# Altium footprint library FootPrintLib_10.PcbLib: 270 footprints (part 11 of 17)
Each footprint in its own frame and in the unit in brackets; x right, y up, seen from the top. Pads: shape width x height; smd on the part's side, far side on the other; paste and mask are expansions set on the pad; w line width, h text height; cw(c..) or ccw(c..) is an arc to the next point about the centre after c.
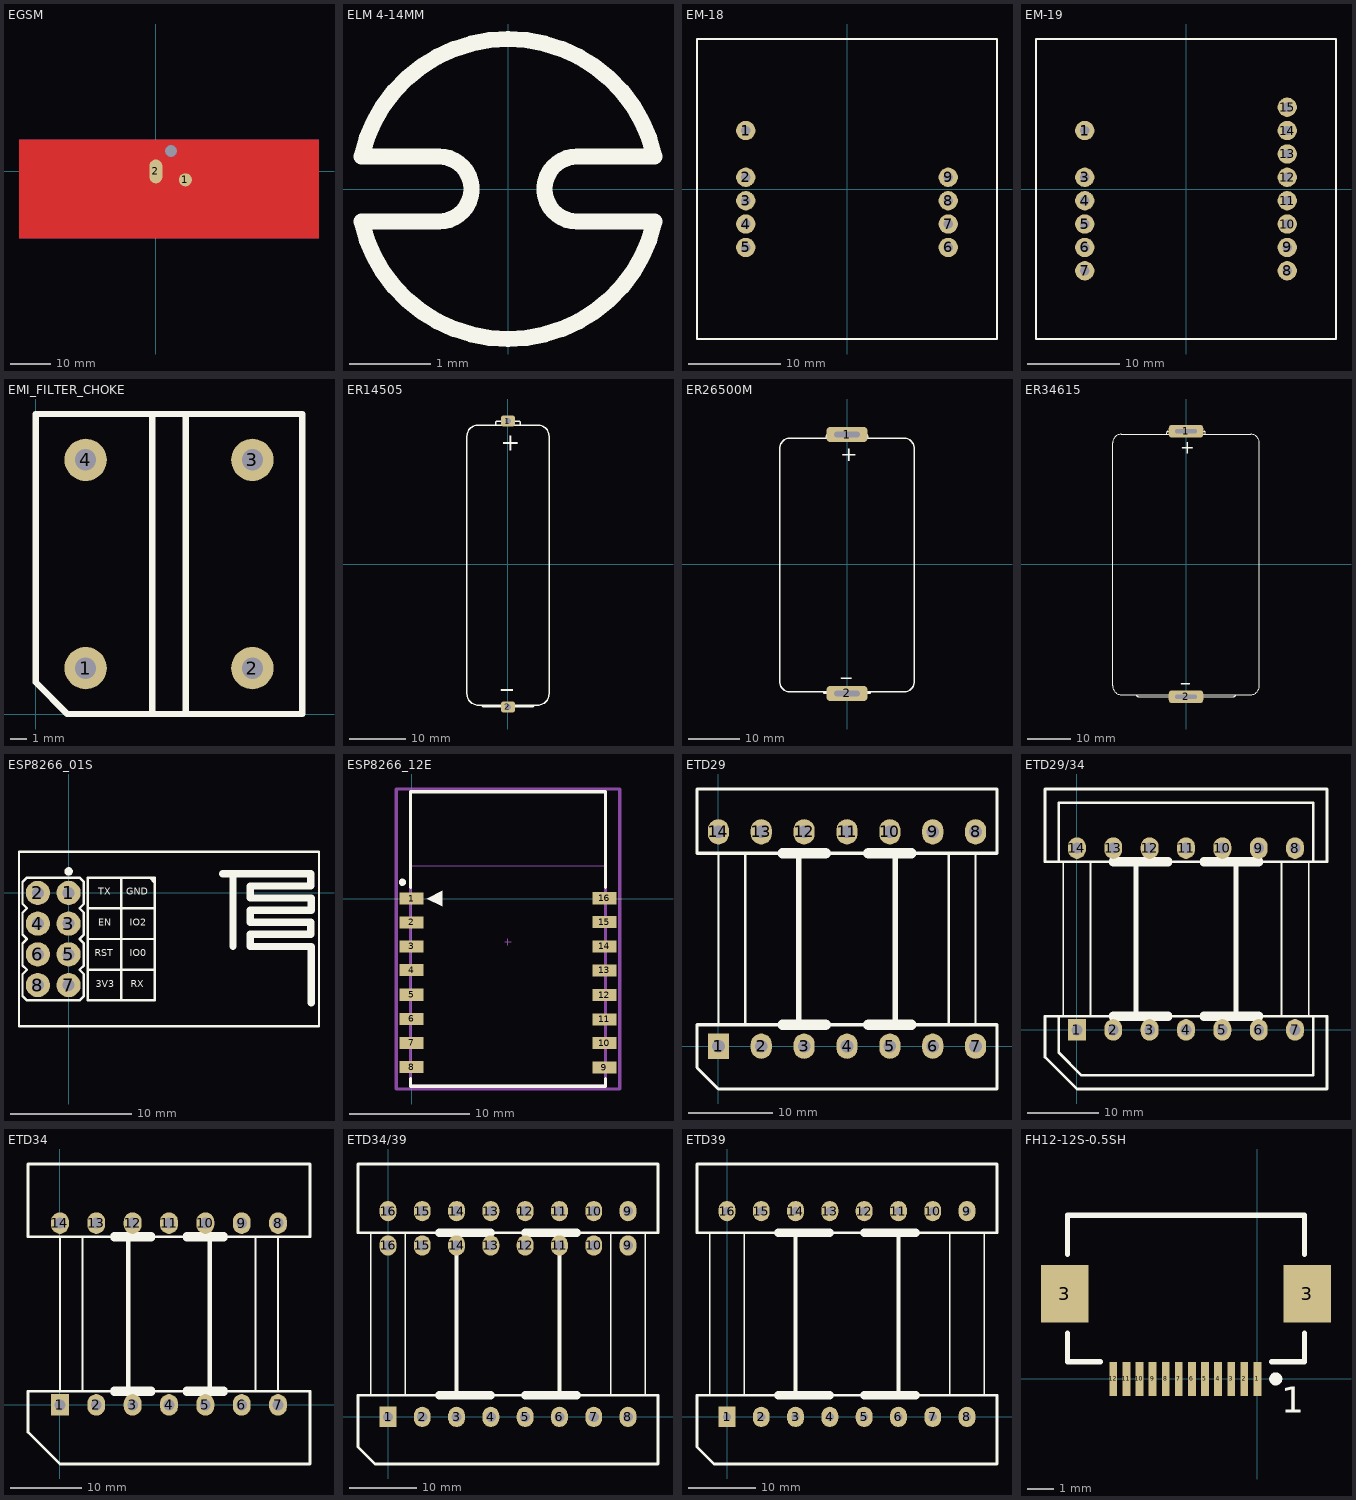
[diagram p10: the footprints below, top view; thin cyan lines are the x and y axes]

## EGSM [mm] "EGSM Antenna (900MHz Band)"
height 9.4
pads (3):
  round 1.27 hole 3 unplated: 0(3.788,5.058)
  round 3.25 smd: 1(7.349,-2.085)
  oval 3.25x5.95 smd: 2(0,0)
Top Layer:
  rectangle: -17.736,-4.874 -11.236,-1.354
  rectangle: -34.086,-16.674 -14.686,-15.014
  region: -33.286,7.926 -34.086,7.926 -34.086,-16.674 -33.286,-16.674
  rectangle: 0.314,-14.374 1.614,-0.123
  rectangle: -34.086,-1.354 -10.486,7.926
  rectangle: -17.736,-4.874 -4.498,-4.074
  rectangle: -19.729,-7.6 -4.832,-6.66
  rectangle: -19.729,-10.063 -5.889,-9.093
  region: -0.376,-13.163 0.276,-13.847 1.019,-13.139 0.367,-12.455
  region: 6.971,-12.455 6.319,-13.139 7.062,-13.847 7.714,-13.163
  region: 27.067,-9.093 13.227,-9.093 13.227,-10.063 27.067,-10.063
  region: 27.067,-6.66 12.17,-6.66 12.17,-7.6 27.067,-7.6
  region: 25.074,-4.074 11.836,-4.074 11.836,-4.874 25.074,-4.874
  region: 40.624,7.926 17.024,7.926 17.024,-1.354 40.624,-1.354
  region: 7.024,-2.012 5.724,-2.012 5.724,-14.374 7.024,-14.374
  rectangle: 39.824,-16.674 40.624,7.926
  region: 40.624,-15.014 21.724,-15.014 21.724,-16.674 40.624,-16.674
  region: 25.074,-1.354 17.774,-1.354 17.774,-4.874 25.074,-4.874
  pour cut-out: -34.086,7.926 -34.086,-16.674 40.624,-16.674 40.624,7.926
  region: -20.683,-6.665 -25.006,-9.764 -22.386,-12.014 -19.497,-9.953 -19.583,-9.365 -20.002,-8.806 -20.141,-8.362 -19.906,-7.639 -19.539,-7.413 -19.524,-6.784
  region: -4.498,-4.074 0.344,-7.439 0.34,-11.935 -5.896,-7.587 -4.642,-6.497 -4.344,-5.922 -4.54,-5.137 -4.818,-4.88 -4.622,-4.13
  region: -5.889,-9.093 -5.889,-10.063 0.314,-14.374 0.314,-13.404
  region: 13.227,-9.093 13.227,-10.063 7.024,-14.374 7.024,-13.404
  region: 11.836,-4.074 6.994,-7.439 6.998,-11.935 13.234,-7.587 11.98,-6.497 11.682,-5.922 11.878,-5.137 12.156,-4.88 11.96,-4.13
  region: 28.021,-6.665 32.344,-9.764 29.724,-12.014 26.835,-9.953 26.921,-9.365 27.34,-8.806 27.479,-8.362 27.244,-7.639 26.877,-7.413 26.862,-6.784
  lines w0.254: -33.42,-14.712 ccw(c-32.99,-14.712) -32.988,-15.142 ; -33.418,-1.655 cw(c-32.988,-1.654) -32.988,-1.224 ; -20.637,-6.787 -4.488,-6.787 ; -19.498,-9.332 cw(c-18.994,-8.325) -19.475,-7.307 ; -18.044,-1.218 cw(c-18.042,-1.648) -17.612,-1.648 ; -11.367,-1.653 cw(c-10.937,-1.652) -10.937,-1.222 ; -11.365,-3.773 ccw(c-10.935,-3.773) -10.933,-4.203 ; -5.033,-6.778 ccw(c-5.514,-5.759) -5.01,-4.752 ; -0.433,-13.025 ccw(c-0.431,-12.164) 0.357,-11.817 ; 6.981,-11.817 ccw(c7.769,-12.164) 7.771,-13.025 ; 12.348,-4.752 ccw(c12.852,-5.759) 12.371,-6.778 ; 17.473,-4.203 ccw(c17.475,-3.773) 17.905,-3.773 ; 17.475,-1.222 cw(c17.475,-1.652) 17.905,-1.653 ; 25.954,-6.787 27.986,-6.787 ; 26.813,-7.307 cw(c26.332,-8.325) 26.836,-9.332 ; 39.519,-15.145 ccw(c39.521,-14.715) 39.951,-14.715 ; 39.519,-1.222 cw(c39.519,-1.652) 39.949,-1.653
Bottom Layer:
  pour cut-out: -34.086,7.926 -34.086,-16.674 40.624,-16.674 40.624,7.926

## ELM 4-14MM [mm] "LED Mounting Hardware"
height 14
Top Overlay:
  lines w0.2: -1.806,-0.401 ccw(c0,0) 1.806,-0.401 ; -1.806,0.401 cw(c0,0) 1.806,0.401 ; -1.803,-0.4 -0.85,-0.4 ccw(c-0.85,0) -0.85,0.4 -1.803,0.4 ; 1.803,-0.4 0.85,-0.4 cw(c0.85,0) 0.85,0.4 1.803,0.4
3D body "ELM 4.STEP": height 12.7, standoff 0, extent -1.796,-1.841 1.796,1.842

## EM-18 [mm] "RFID Reader Module 32/6x32/6mm"
height 9.2
pads (9):
  round 2.1 hole 1: 1(-11,6.35) 2(-11,1.27) 3(-11,-1.27) 4(-11,-3.81) 5(-11,-6.35) 6(11,-6.35) 7(11,-3.81) 8(11,-1.27) 9(11,1.27)
Top Overlay:
  lines w0.2: -16.3,-16.3 -16.3,16.3 16.3,16.3 16.3,-16.3 -16.3,-16.3
3D body: height 9.2, standoff -2.5, extent 7.025,-0.95 7.025,-0.95
3D body: height 9.2, standoff -2.5, extent 0.525,-1.175 0.525,-1.175
3D body: height 9.2, standoff -2.5, extent -8.675,-0.925 -8.675,-0.925
3D body: height 1.9, standoff 0, extent 16.3,16.3 16.3,16.3
3D body: height 1.9, standoff 0, extent 16.3,16.3 16.3,16.3
3D body: height 9.2, standoff -2.5, extent 12.8,7.425 12.8,7.425
3D body "EM_18.step": height 9.21, standoff -2.5, extent -16.3,-16.3 16.3,16.3

## EM-19 [mm] "RFID Reader Module 32/6x32/6mm"
height 9.2
pads (14):
  round 2.1 hole 1: 1(-11,6.35) 3(-11,1.27) 4(-11,-1.27) 5(-11,-3.81) 6(-11,-6.35) 7(-11,-8.89) 8(11,-8.89) 9(11,-6.35) 10(11,-3.81) 11(11,-1.27) 12(11,1.27) 13(11,3.81) 14(11,6.35) 15(11,8.89)
Top Overlay:
  lines w0.2: -16.3,-16.3 -16.3,16.3 16.3,16.3 16.3,-16.3 -16.3,-16.3
3D body "EM_19.step": height 9.21, standoff -2.5, extent -16.3,-16.3 16.3,16.3
3D body: height 1.9, standoff 0, extent 16.3,16.3 16.3,16.3
3D body: height 1.9, standoff 0, extent 16.3,16.3 16.3,16.3

## EMI_FILTER_CHOKE [mm] "Common Mode Inductors/EMI Filters For AC Power Supply"
height 20.5
pads (4):
  round 2.54 hole 1.27: 1(3,2.75) 2(13,2.75) 3(13,15.25) 4(3,15.25)
Top Overlay:
  lines w0.381: 7,0 7,18 ; 9,0 9,18 ; 0,1.905 1.905,0 16,0 16,18 0,18 0,1.905

## ER14505 [mm] "Primary Lithium Thionyl Chloride 3V6, 2400mA"
height 14.5
pads (2):
  rrect50% 2.5x2 hole 1: 1(0,25.25) 2(0,-25.25)
Top Overlay:
  lines w0.254: -4.55,-24.95 ccw(c-4.25,-24.95) -4.25,-25.25 4.25,-25.25 ccw(c4.25,-24.95) 4.55,-24.95 ; -2.2,24.55 -2.2,24.95 cw(c-1.9,24.95) -1.9,25.25 1.9,25.25 cw(c1.9,24.95) 2.2,24.95 2.2,24.55 ; -7.25,-22.95 ccw(c-5.25,-22.95) -5.25,-24.95 5.25,-24.95 ccw(c5.25,-22.95) 7.25,-22.95 7.25,22.55 ccw(c5.25,22.55) 5.25,24.55 -5.25,24.55 ccw(c-5.25,22.55) -7.25,22.55 -7.25,-22.95
  text "_" at -1.15,-21.5 h3
  text "+" at -1.3,20 h3
3D body "User Library-BATTERY_AA.STEP": height 14.26, standoff 0.24, extent -7.01,-24.892 7.01,24.908

## ER26500M [mm] "Primary Lithium Thionyl Chloride 3V6, 6500mA"
height 26.2
pads (2):
  rrect50% 8x3 hole 1 slot 5 at 0 deg: 1(0,25.25) 2(0,-25.25)
Top Overlay:
  lines w0.254: -4.55,-24.95 ccw(c-4.25,-24.95) -4.25,-25.25 4.25,-25.25 ccw(c4.25,-24.95) 4.55,-24.95 ; -4,24.55 -4,24.95 cw(c-3.7,24.95) -3.7,25.25 3.7,25.25 cw(c3.7,24.95) 4,24.95 4,24.55 ; -13.1,-22.95 ccw(c-11.1,-22.95) -11.1,-24.95 11.1,-24.95 ccw(c11.1,-22.95) 13.1,-22.95 13.1,22.55 ccw(c11.1,22.55) 11.1,24.55 -11.1,24.55 ccw(c-11.1,22.55) -13.1,22.55 -13.1,-22.95
  text "_" at -1.15,-21.5 h3
  text "+" at -1.3,20 h3
3D body "User Library-Bateria 1,5v.STEP": height 25.75, standoff 0.45, extent -12.65,-24.892 12.65,24.908

## ER34615 [mm] "Primary Lithium Thionyl Chloride 3V6, 6500mA"
height 26.2
pads (2):
  rrect50% 8x3 hole 1 slot 5 at 0 deg: 1(0,30.75) 2(0,-30.75)
Top Overlay:
  lines w0.254: -11.5,-30.25 ccw(c-11,-30.25) -11,-30.75 11,-30.75 ccw(c11,-30.25) 11.5,-30.25 ; -4.5,30.05 -4.5,30.45 cw(c-4.2,30.45) -4.2,30.75 4.2,30.75 cw(c4.2,30.45) 4.5,30.45 4.5,30.05 ; -17,-28.25 ccw(c-15,-28.25) -15,-30.25 15,-30.25 ccw(c15,-28.25) 17,-28.25 17,28.05 ccw(c15,28.05) 15,30.05 -15,30.05 ccw(c-15,28.05) -17,28.05 -17,-28.25
  text "+" at -1.3,25.5 h3
  text "_" at -1.15,-27 h3
3D body "SW3dPS-d-cell battery.STEP": height 33.75, standoff 0.25, extent -16.75,-30.251 16.75,30.249

## ESP8266_01S [mm]
height 5.5
pads (8):
  round 2 hole 1: 1(0,0) 2(-2.54,0) 3(0,-2.54) 4(-2.54,-2.54) 5(0,-5.08) 6(-2.54,-5.08) 7(0,-7.62) 8(-2.54,-7.62)
Top Overlay:
  circle w0.4: c0,1.775 r0.15
  lines w0.2: -3.45,-6.35 -3.81,-5.99 -3.81,-4.18 -3.44,-3.81 ; -3.45,-3.81 -3.81,-3.45 -3.81,-1.64 -3.44,-1.27 -3.81,-0.9 -3.81,0.91 -3.45,1.27 0.91,1.27 1.27,0.91 1.27,-0.9 0.9,-1.27 1.27,-1.64 1.27,-3.45 0.91,-3.81 ; -3.44,-6.35 -3.81,-6.72 -3.81,-8.53 -3.45,-8.89 0.91,-8.89 1.27,-8.53 1.27,-6.72 0.9,-6.35 ; 0.9,-3.81 1.27,-4.18 1.27,-5.99 0.91,-6.35 ; 1.6,-6.35 7.125,-6.35 ; 1.6,-3.81 7.125,-3.81 ; 1.6,-1.27 7.125,-1.27 ; 4.363,-8.89 4.363,1.27 ; 6.725,1.25 7.1,0.875 ; 6.887,1.263 7.1,1.05 ; -4.1,-11.01 -4.1,3.39 20.7,3.39 20.7,-11.01 -4.1,-11.01 ; 1.6,-8.89 1.6,1.27 7.125,1.27 7.125,-8.89 1.6,-8.89
  lines w0.6: 12.725,1.575 20.025,1.575 20.025,0.575 15.025,0.575 15.025,-0.425 20.05,-0.425 20.05,-1.425 15.025,-1.425 15.025,-2.425 20.025,-2.425 20.025,-3.425 15.025,-3.425 15.025,-4.425 20.05,-4.425 20.05,-9.075 ; 13.6,-4.425 13.6,1.575
  text "3V3" at 2.242,-7.995 h1
  text "RX" at 5.137,-7.995 h1
  text "RST" at 2.15,-5.45 h1
  text "IO0" at 5.056,-5.455 h1
  text "EN" at 2.449,-2.915 h1
  text "IO2" at 5.057,-2.915 h1
  text "GND" at 4.775,-0.375 h1
  text "TX" at 2.442,-0.375 h1
3D body "ESP8266_01S_V2.step": height 5.5, standoff -6, extent -4.1,-11.01 20.7,3.39
3D body: height 0.01, standoff 0, extent -0.75,-0.751 0.75,0.751
3D body: height 0.01, standoff 0, extent -0.75,-3.291 0.75,-1.789
3D body: height 0.01, standoff 0, extent -0.75,-5.831 0.75,-4.329
3D body: height 0.01, standoff 0, extent -0.75,-8.371 0.75,-6.869
3D body: height 0.01, standoff 0, extent -3.29,-8.371 -1.79,-6.869
3D body: height 0.01, standoff 0, extent -3.29,-5.831 -1.79,-4.329
3D body: height 0.01, standoff 0, extent -3.29,-3.291 -1.79,-1.789
3D body: height 0.01, standoff 0, extent -3.29,-0.751 -1.79,0.751

## ESP8266_12E [mm]
pads (16):
  rect 2x1 smd: 1(0,0) 2(0,-1.97) 3(0,-3.97) 4(0,-5.94) 5(0,-7.98) 6(0,-9.99) 7(0,-11.98) 8(0,-13.99) 9(16,-14.03) 10(16,-11.99) 11(16,-10.03) 12(16,-8.01) 13(16,-5.95) 14(16,-3.97) 15(16,-1.95) 16(16,0.03)
Top Overlay:
  circle w0.3: c-0.762,1.356 r0.15
  region: 1.27,0 2.54,-0.635 2.54,0.635
  lines w0.254: -0.084,-14.916 -0.084,-15.568 16.084,-15.568 16.084,-14.916 ; -0.084,0.916 -0.084,8.865 16.084,8.865 16.084,0.916
Mechanical 13:
  lines w0.051: -0.127,2.727 16.129,2.727 16.129,8.966 -0.127,8.966 -0.127,2.727
  lines w0.254: -0.084,-15.568 -0.084,8.89 16.084,8.89 16.084,-15.568 -0.084,-15.568
  text "ANTENNA AREA" at 0.127,7.874 h0.25
  text "CUTOUT POLYGON" at 0.127,7.366 h0.25
Mechanical 15:
  lines w0.1: 7.746,-3.598 8.254,-3.598 ; 8,-3.852 8,-3.344
  lines w0.254: -1.27,-15.799 17.272,-15.799 17.272,9.093 -1.27,9.093 -1.27,-15.799
3D body "User Library-esp-12s.step": height 3.15, standoff 0.03, extent 0.001,-15.556 16.001,8.444

## ETD29 [mm]
pads (14):
  rect 2.5x3 hole 1.5: 1(0,0)
  oval 2.5x3 hole 1.5: 2(5.08,0) 3(10.16,0) 4(15.24,0) 5(20.32,0) 6(25.4,0) 7(30.48,0) 8(30.48,25.4) 9(25.4,25.4) 10(20.32,25.4) 11(15.24,25.4) 12(10.16,25.4) 13(5.08,25.4) 14(0,25.4)
Top Overlay:
  lines w0.254: 0,2.54 0,22.86 ; 3.175,2.54 3.175,22.86 ; 27.305,2.54 27.305,22.86 ; 30.48,2.54 30.48,22.86
  lines w0.381: -2.54,-2.54 0,-5.08 33.02,-5.08 33.02,2.54 -2.54,2.54 -2.54,-2.54 ; -2.54,22.86 -2.54,30.48 33.02,30.48 33.02,22.86 -2.54,22.86
  lines w0.635: 9.525,2.54 9.525,22.86 ; 20.955,2.54 20.955,22.86
  lines w1.27: 7.62,2.54 12.7,2.54 ; 7.62,22.86 12.7,22.86 ; 17.78,2.54 22.86,2.54 ; 17.78,22.86 22.86,22.86

## ETD29/34 [mm]
pads (14):
  rect 2.5x3 hole 1.5: 1(0,0)
  oval 2.5x3 hole 1.5: 2(5.08,0) 3(10.16,0) 4(15.24,0) 5(20.32,0) 6(25.4,0) 7(30.48,0) 8(30.48,25.4) 9(25.4,25.4) 10(20.32,25.4) 11(15.24,25.4) 12(10.16,25.4) 13(5.08,25.4) 14(0,25.4)
Top Overlay:
  lines w0.254: -1.905,1.905 -1.905,23.495 ; 1.905,1.905 1.905,23.495 ; 28.575,1.905 28.575,23.495 ; 32.385,1.905 32.385,23.495
  lines w0.381: -2.54,1.905 -2.54,-3.175 0.635,-6.35 33.02,-6.35 33.02,1.905 ; -2.54,23.495 -2.54,31.75 33.02,31.75 33.02,23.495 ; -4.445,-3.81 -4.445,1.905 34.925,1.905 34.925,-8.255 0,-8.255 -4.445,-3.81 ; -4.445,23.495 34.925,23.495 34.925,33.655 -4.445,33.655 -4.445,23.495
  lines w0.635: 8.255,1.905 8.255,23.495 ; 22.225,1.905 22.225,23.495
  lines w1.27: 5.08,1.905 12.7,1.905 ; 5.08,23.495 12.7,23.495 ; 17.78,1.905 25.4,1.905 ; 17.78,23.495 25.4,23.495

## ETD34 [mm]
pads (14):
  rect 2.5x3 hole 1.5: 1(0,0)
  oval 2.5x3 hole 1.5: 2(5.08,0) 3(10.16,0) 4(15.24,0) 5(20.32,0) 6(25.4,0) 7(30.48,0) 8(30.48,25.4) 9(25.4,25.4) 10(20.32,25.4) 11(15.24,25.4) 12(10.16,25.4) 13(5.08,25.4) 14(0,25.4)
Top Overlay:
  lines w0.254: 0,1.905 0,23.495 ; 3.175,1.905 3.175,23.495 ; 27.305,1.905 27.305,23.495 ; 30.48,1.905 30.48,23.495
  lines w0.381: -4.445,-3.81 -4.445,1.905 34.925,1.905 34.925,-8.255 0,-8.255 -4.445,-3.81 ; -4.445,23.495 34.925,23.495 34.925,33.655 -4.445,33.655 -4.445,23.495
  lines w0.635: 9.525,1.905 9.525,23.495 ; 20.955,1.905 20.955,23.495
  lines w1.27: 7.62,1.905 12.7,1.905 ; 7.62,23.495 12.7,23.495 ; 17.78,1.905 22.86,1.905 ; 17.78,23.495 22.86,23.495

## ETD34/39 [mm]
pads (24):
  rect 2.5x3 hole 1.5: 1(0,0)
  oval 2.5x3 hole 1.5: 2(5.08,0) 3(10.16,0) 4(15.24,0) 5(20.32,0) 6(25.4,0) 7(30.48,0) 8(35.56,0) 9(35.56,25.4) 9(35.56,30.48) 10(30.48,25.4) 10(30.48,30.48) 11(25.4,25.4) 11(25.4,30.48) 12(20.32,25.4) 12(20.32,30.48) 13(15.24,25.4) 13(15.24,30.48) 14(10.16,25.4) 14(10.16,30.48) 15(5.08,25.4) 15(5.08,30.48) 16(0,25.4) 16(0,30.48)
Top Overlay:
  lines w0.254: -2.54,3.175 -2.54,27.305 ; 2.54,3.175 2.54,27.305 ; 33.02,3.175 33.02,27.305 ; 38.1,3.175 38.1,27.305
  lines w0.381: -4.445,-4.445 -4.445,3.175 40.005,3.175 40.005,-6.985 -1.905,-6.985 -4.445,-4.445 ; -4.445,27.305 -4.445,37.465 40.005,37.465 40.005,27.305 -4.445,27.305
  lines w0.635: 10.16,3.175 10.16,27.305 ; 25.4,3.175 25.4,27.305
  lines w1.27: 7.62,3.175 15.24,3.175 ; 7.62,27.305 15.24,27.305 ; 20.32,3.175 27.94,3.175 ; 20.32,27.305 27.94,27.305

## ETD39 [mm]
pads (16):
  rect 2.5x3 hole 1.2: 1(0,0)
  oval 2.5x3 hole 1.2: 2(5.08,0) 3(10.16,0) 4(15.24,0) 5(20.32,0) 6(25.4,0) 7(30.48,0) 8(35.56,0) 9(35.56,30.48) 10(30.48,30.48) 11(25.4,30.48) 12(20.32,30.48) 13(15.24,30.48) 14(10.16,30.48) 15(5.08,30.48) 16(0,30.48)
Top Overlay:
  lines w0.254: -2.54,3.175 -2.54,27.305 ; 2.54,3.175 2.54,27.305 ; 33.02,3.175 33.02,27.305 ; 38.1,3.175 38.1,27.305
  lines w0.381: -4.445,-4.445 -1.905,-6.985 40.005,-6.985 40.005,3.175 -4.445,3.175 -4.445,-4.445 ; -4.445,27.305 40.005,27.305 40.005,37.465 -4.445,37.465 -4.445,27.305
  lines w0.635: 10.16,3.175 10.16,27.305 ; 25.4,3.175 25.4,27.305
  lines w1.27: 7.62,3.175 15.24,3.175 ; 7.62,27.305 15.24,27.305 ; 20.32,3.175 27.94,3.175 ; 20.32,27.305 27.94,27.305

## FH12-12S-0.5SH [mm]
height 20
pads (14):
  rect 0.3x1.3 smd: 1(0,0) 2(-0.5,0) 3(-1,0) 4(-1.5,0) 5(-2,0) 6(-2.5,0) 7(-3,0) 8(-3.5,0) 9(-4,0) 10(-4.5,0) 11(-5,0) 12(-5.5,0)
  rect 1.8x2.2 smd: 3(-7.35,3.25) 3(1.9,3.25)
Top Overlay:
  circle w0.25: c0.7,0 r0.125
  lines w0.2: -7.25,1.75 -7.25,0.65 -6,0.65 ; -7.25,4.75 -7.25,6.25 ; 0.55,0.65 1.8,0.65 1.8,1.75 ; 1.8,4.75 1.8,6.25 -7.25,6.25 ; -7.25,6.25 -7.25,6.25
  text "1" at 0.918,-1.296 h1